# Altium integrated library VIETTIEN_2.IntLib: 110 symbols (part 2 of 5)

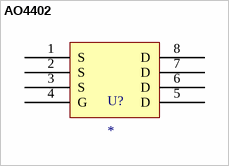
[diagram p23: symbol AO4402]

## AO4402
designator U?
N-Channel 20 V 20A (Ta) 3.1W (Ta) Surface Mount 8-SOIC
footprint SOIC127P600X175-8N
pins: 1 S, 2 S, 3 S, 4 G, 5 D, 6 D, 7 D, 8 D


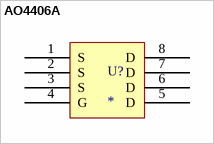
[diagram p24: symbol AO4406A]

## AO4406A
designator U?
N-Channel 30 V 13A (Ta) 3.1W (Ta) Surface Mount 8-SOIC
footprint SOIC127P600X175-8N
pins: 1 S, 2 S, 3 S, 4 G, 5 D, 6 D, 7 D, 8 D


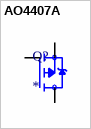
[diagram p25: symbol AO4407A]

## AO4407A
designator Q?
P-Channel 30 V 12A (Ta) 3.1W (Ta) Surface Mount 8-SOIC; MF: Alpha &; MP: AO4407A; SnapEDA_Link: https://www.snapeda.com/parts/AO4407A/Alpha/view-part/?ref=snap; Package: SOIC-8 Alpha &amp; Omega Semiconductor; Value: *; Check_prices: https://www.snapeda.com/parts/AO4407A/Alpha/view-part/?ref=eda
footprint SOIC127P600X175-8N
pins: 1 S, 2 S, 3 S, 4 G, 5 D, 6 D, 7 D, 8 D


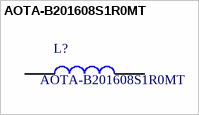
[diagram p26: symbol AOTA-B201608S1R0MT]

## AOTA-B201608S1R0MT
designator L?
IND 1uH 3.7A 52; Manufacturer_Name: ABRACON; Geometry.Height: 0.8mm; Manufacturer_Part_Number: AOTA-B201608S1R0MT; Mouser Part Number: *; Mouser Price/Stock: *; Arrow Part Number: *; Arrow Price/Stock: *; Datasheet Link: https://abracon.com/datasheets/AOTA-B201608S.pdf
footprint INDC2016X80N
pins: 1, 2


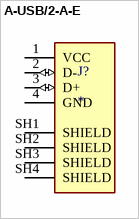
[diagram p27: symbol A-USB/2-A-E]

## A-USB/2-A-E
designator J?
USB-A (USB TYPE-A) USB 2.0 Receptacle Connector 4 Position Through Hole, Right Angle; MP: A-USB/2-A-E; MF: Assmann; Check_prices: https://www.snapeda.com/parts/A-USB/2-A-E/Assmann+WSW+Components/view-part/?ref=eda; Price: None; SnapEDA_Link: https://www.snapeda.com/parts/A-USB/2-A-E/Assmann+WSW+Components/view-part/?ref=snap; Package: None; Value: *; Availability: In Stock; Purchase-URL: https://pricing.snapeda.com/search/part/A-USB/2-A-E/?ref=eda
footprint ASSMANN_A-USB/2-A-E
pins: 1 VCC (power), 2 D- (io), 3 D+ (io), 4 GND (power), SH1 SHIELD (power), SH2 SHIELD (power), SH3 SHIELD (power), SH4 SHIELD (power)


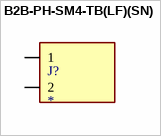
[diagram p28: symbol B2B-PH-SM4-TB(LF)(SN)]

## B2B-PH-SM4-TB(LF)(SN)
designator J?
Connector Header Surface Mount 2 position 0.079 (2.00mm); MF: JST Sales; MP: B2B-PH-SM4-TB(LF)(SN); SnapEDA_Link: https://www.snapeda.com/parts/B2B-PH-SM4-TB(LF)(SN)/JST+Sales+America+Inc./view-part/?ref=snap; Package: NON STANDARD-2 JST; Value: *; Check_prices: https://www.snapeda.com/parts/B2B-PH-SM4-TB(LF)(SN)/JST+Sales+America+Inc./view-part/?ref=eda
footprint SM4-CON
pins: 1 (io), 2 (io)


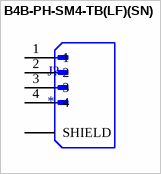
[diagram p29: symbol B4B-PH-SM4-TB(LF)(SN)]

## B4B-PH-SM4-TB(LF)(SN)
designator J?
Connector Header Surface Mount 4 position 0.079 (2.00mm); MF: JST Sales; MP: B4B-PH-SM4-TB(LF)(SN); SnapEDA_Link: https://www.snapeda.com/parts/B4B-PH-SM4-TB(LF)(SN)/JST+Sales+America+Inc./view-part/?ref=snap; Package: NON STANDARD-4 JST; Value: *; Check_prices: https://www.snapeda.com/parts/B4B-PH-SM4-TB(LF)(SN)/JST+Sales+America+Inc./view-part/?ref=eda
footprint JST_B4B-PH-SM4-TB(LF)(SN)
pins: 1, 2, 3, 4, SH1 SHIELD, SH2 SHIELD


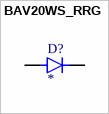
[diagram p30: symbol BAV20WS_RRG]

## BAV20WS_RRG
designator D?
MF: {'manufacturer': u'Taiwan Semiconductor'}; MP: BAV20WS_RRG; Package: None; Price: None; Value: *; Availability: Unavailable
footprint DIO_BAV20WS_RRG
pins: A, C K


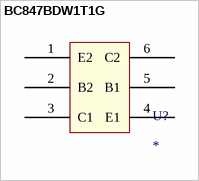
[diagram p31: symbol BC847BDW1T1G]

## BC847BDW1T1G
designator U?
Bipolar (BJT) Transistor Array 2 NPN (Dual) 45V 100mA 100MHz 380mW Surface Mount SC-88/SC70-6/SOT-363; MF: onsemi; MP: BC847BDW1T1G; SnapEDA_Link: https://www.snapeda.com/parts/BC847BDW1T1G/Onsemi/view-part/?ref=snap; Package: SC-88-6 ON Semiconductor; Value: *; Check_prices: https://www.snapeda.com/parts/BC847BDW1T1G/Onsemi/view-part/?ref=eda
footprint SOT65P210X110-6N
pins: 1 E2, 2 B2, 3 C1, 4 E1, 5 B1, 6 C2


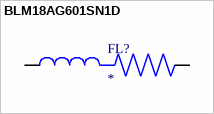
[diagram p32: symbol BLM18AG601SN1D]

## BLM18AG601SN1D
designator FL?
600 Ohms @ 100 MHz 1 - Ferrite Bead 0603 (1608 Metric) 500mA 380mOhm; MF: Murata; MP: BLM18AG601SN1D; Check_prices: https://www.snapeda.com/parts/BLM18AG601SN1D/Murata/view-part/?ref=eda; SnapEDA_Link: https://www.snapeda.com/parts/BLM18AG601SN1D/Murata/view-part/?ref=snap; Availability: In Stock; Value: *; Price: None; Package: 1608 Murata; Purchase-URL: https://pricing.snapeda.com/search/part/BLM18AG601SN1D/?ref=eda
footprint BEADC1608X95N
pins: 1, 2


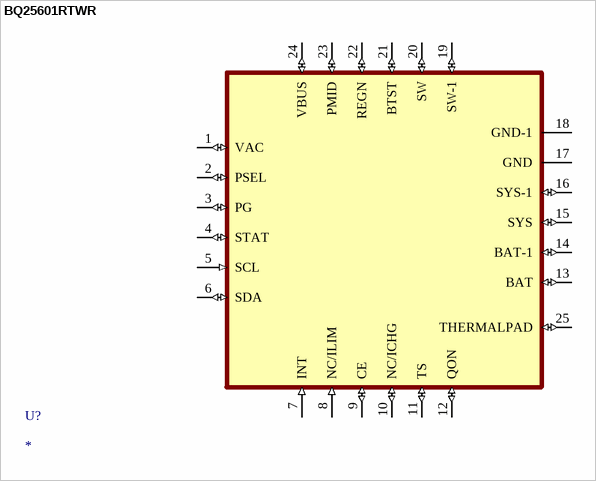
[diagram p33: symbol BQ25601RTWR]

## BQ25601RTWR
designator U?
MP: BQ25601RTWR; Package: None; Price: None; Value: *; Availability: Unavailable
footprint QFN50P400X400X80-25N
pins: 1 VAC (io), 2 PSEL (io), 3 PG (io), 4 STAT (io), 5 SCL (in), 6 SDA (io), 7 INT (in), 8 NC/ILIM (in), 9 CE (io), 10 NC/ICHG (io), 11 TS (io), 12 QON (io), 13 BAT (io), 14 BAT-1 (io), 15 SYS (io), 16 SYS-1 (io), 17 GND (power), 18 GND-1 (power), 19 SW-1 (io), 20 SW (io), 21 BTST (io), 22 REGN (io), 23 PMID (io), 24 VBUS (io), 25 THERMALPAD (io)


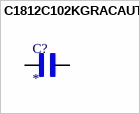
[diagram p34: symbol C1812C102KGRACAUTO]

## C1812C102KGRACAUTO
designator C?
1000 pF Â±10% 2000V (2kV) Ceramic Capacitor X7R 1812 (4532 Metric); MF: KEMET; MP: C1812C102KGRACAUTO; SnapEDA_Link: https://www.snapeda.com/parts/C1812C102KGRACAUTO/KEMET/view-part/?ref=snap; Package: 4532 KEMET; Value: *; Check_prices: https://www.snapeda.com/parts/C1812C102KGRACAUTO/KEMET/view-part/?ref=eda
footprint CAPC4532X155N
pins: 1, 2


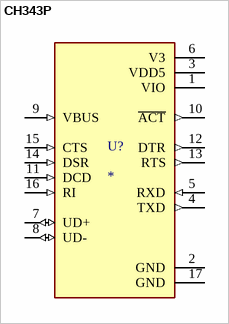
[diagram p35: symbol CH343P]

## CH343P
designator U?
USB to High-Speed Serial Chip CH343; MF: WCH; MP: CH343P; SnapEDA_Link: https://www.snapeda.com/parts/CH343P/WCH/view-part/?ref=snap; Package: Package; Value: *; Check_prices: https://www.snapeda.com/parts/CH343P/WCH/view-part/?ref=eda
footprint QFN50P300X300X80-17N
pins: 1 VIO (power), 2 GND (power), 3 VDD5 (power), 4 TXD (out), 5 RXD (in), 6 V3 (power), 7 UD+ (io), 8 UD- (io), 9 VBUS (in), 10 ~{ACT} (out), 11 DCD (in), 12 DTR (out), 13 RTS (out), 14 DSR (in), 15 CTS (in), 16 RI (in), 17 GND (power)


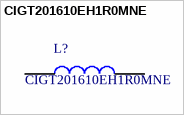
[diagram p36: symbol CIGT201610EH1R0MNE]

## CIGT201610EH1R0MNE
designator L?
RF Inductors - SMD CIGT,Thin Film,0806,1.0uH,1.0?,7 embossed,-20 20%; Manufacturer_Name: SAMSUNG; Geometry.Height: 1mm; Manufacturer_Part_Number: CIGT201610EH1R0MNE; Mouser Part Number: 187-CIGT201610EH1R0M; Mouser Price/Stock: https://www.mouser.co.uk/ProductDetail/Samsung-Electro-Mechanics/CIGT201610EH1R0MNE?qs=xZ%2FP%252Ba9zWqaBrqhkAlUALQ%3D%3D; Arrow Part Number: CIGT201610EH1R0MNE; Arrow Price/Stock: https://www.arrow.com/en/products/cigt201610eh1r0mne/samsung-electro-mechanics?region=nac; Datasheet Link: https://www.mouser.com/ProductDetail/Samsung-Electro-Mechanics/CIGT201610EH1R0MNE?qs=xZ%2FP%252Ba9zWqaBrqhkAlUALQ%3D%3D&utm_id=22030780983&gad_source=1&gclid=EAIaIQobChMIvLSdy--WiwMVck1HAR1lcz2jEAAYAyAAEgL_IvD_BwE
footprint INDC2016X100N
pins: 1, 2


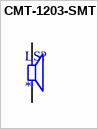
[diagram p37: symbol CMT-1203-SMT]

## CMT-1203-SMT
designator LS?
12 mm, 25 V, 81 dB, Surface Mount (SMT), Piezo Audio Transducer Buzzer; MF: Same Sky; MP: CMT-1203-SMT-TR; SnapEDA_Link: https://www.snapeda.com/parts/CMT-1203-SMT-TR/Same+Sky/view-part/?ref=snap; Package: CUI Inc.; Value: *; Check_prices: https://www.snapeda.com/parts/CMT-1203-SMT-TR/Same+Sky/view-part/?ref=eda
footprint CUI_CMT-1203-SMT
pins: 1, 2


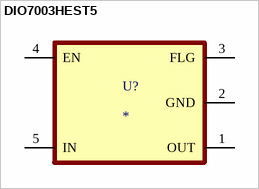
[diagram p38: symbol DIO7003HEST5]

## DIO7003HEST5
designator U?
Low-loss 5.5V power distribution switch with 2A continuous output current, 2.5A current limit, active-high enable, overcurrent protection, short-circuit protection, thermal protection, reverse-current blocking, and undervoltage lockout. Package: SOT-23-5.; MF: Texas Instruments; MP: SN74LVC1G08DBVTE4; SnapEDA_Link: https://www.snapeda.com/parts/SN74LVC1G08DBVTE4/Texas+Instruments/view-part/?ref=snap; Package: SOT-23-5 Texas Instruments; Value: *; Check_prices: https://www.snapeda.com/parts/SN74LVC1G08DBVTE4/Texas+Instruments/view-part/?ref=eda
footprint SOT95P280X145-5N
pins: 1 OUT (power), 2 GND, 3 FLG, 4 EN, 5 IN (power)


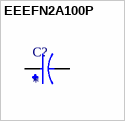
[diagram p39: symbol EEEFN2A100P]

## EEEFN2A100P
designator C?
CAP ALUM 10UF 20% 100V SMD; MF: Panasonic; MP: EEEFN2A100P; SnapEDA_Link: https://www.snapeda.com/parts/EEEFN2A100P/Panasonic/view-part/?ref=snap; Package: RADIAL-2 Panasonic; Value: *; Check_prices: https://www.snapeda.com/parts/EEEFN2A100P/Panasonic/view-part/?ref=eda
footprint CAP_EEEFN2A100P
pins: 1, 2


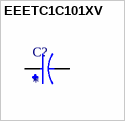
[diagram p40: symbol EEETC1C101XV]

## EEETC1C101XV
designator C?
CAP ALUM 100UF 20% 16V SMD; MF: Panasonic; MP: EEETC1C101XV; Package: RADIAL-2 Panasonic; Price: None; Check_prices: https://www.snapeda.com/parts/EEETC1C101XV/Panasonic/view-part/?ref=eda; Value: *; SnapEDA_Link: https://www.snapeda.com/parts/EEETC1C101XV/Panasonic/view-part/?ref=snap; Availability: In Stock; Purchase-URL: https://pricing.snapeda.com/search/part/EEETC1C101XV/?ref=eda
footprint CAP_EEETC1C101XV
pins: 1, 2


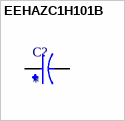
[diagram p41: symbol EEHAZC1H101B]

## EEHAZC1H101B
designator C?
CAP ALUM POLY 100UF 20% 50V T/H; MP: EEHAZC1H101B; MF: Panasonic; Package: RADIAL-2 Panasonic; Availability: In Stock; Value: *; SnapEDA_Link: https://www.snapeda.com/parts/EEHAZC1H101B/Panasonic/view-part/?ref=snap; Price: None; Check_prices: https://www.snapeda.com/parts/EEHAZC1H101B/Panasonic/view-part/?ref=eda; Purchase-URL: https://pricing.snapeda.com/search/part/EEHAZC1H101B/?ref=eda
footprint CAPPRD500W60D1000H950
pins: N, P


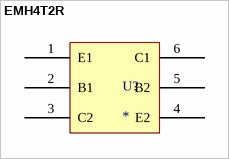
[diagram p42: symbol EMH4T2R]

## EMH4T2R
designator U?
Dual NPN digital transistor with built-in bias resistors, 50V, 100mA, SOT-563 (EMT6) package.
footprint SOT50P160X55-6N
pins: 1 E1, 2 B1, 3 C2, 4 E2, 5 B2, 6 C1


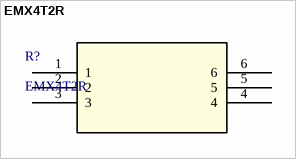
[diagram p43: symbol EMX4T2R]

## EMX4T2R
designator R?
Description; Manufacturer_Name: ROHM Semiconductor; Copyright: Copyright (C) 2026 Ultra Librarian. All rights reserved.; Manufacturer_Part_Number: EMX4T2R; RefDes: RefDes; Type: Type
footprint TRANS_EM6_ROM
pins: 1, 2, 3, 4, 5, 6


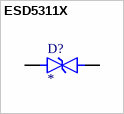
[diagram p44: symbol ESD5311X]

## ESD5311X
designator D?
Bidirectional TVS ESD Protection Diode, 5V Working Voltage, Low Capacitance, 80W Peak Pulse Power, DFN1006-2 Package.; MF: Nexperia; MP: PZU13B2L,315; SnapEDA_Link: https://www.snapeda.com/parts/PZU13B2L,315/Nexperia/view-part/?ref=snap; Package: DFN1006-2-2 Nexperia USA Inc.; Value: *; Check_prices: https://www.snapeda.com/parts/PZU13B2L,315/Nexperia/view-part/?ref=eda
footprint DIO_PZU13B2L,315
pins: 1 K, 2 A


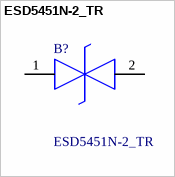
[diagram p45: symbol ESD5451N-2_TR]

## ESD5451N-2_TR
designator B?
1-Line, Bi-directional, Transient Voltage Suppressors; Manufacturer_Name: Will Semiconductor; Manufacturer_Part_Number: ESD5451N-2/TR; Geometry.Height: 0.53mm; Mouser Part Number: *; Mouser Price/Stock: *; Arrow Part Number: *; Arrow Price/Stock: *; Datasheet Link: https://lcsc.com/datasheet/lcsc_datasheet_2410121433_WILLSEMI-Will-Semicon-ESD5451N-2-TR_C239604.pdf
footprint ESD5451N2TR
pins: 1 K1, 2 K2
